# Altium footprint library chipfc_libs.PCBLIB: 315 footprints (part 14 of 20)
Each footprint in its own frame and in the unit in brackets; x right, y up, seen from the top. Pads: shape width x height; smd on the part's side, far side on the other; paste and mask are expansions set on the pad; w line width, h text height; cw(c..) or ccw(c..) is an arc to the next point about the centre after c.
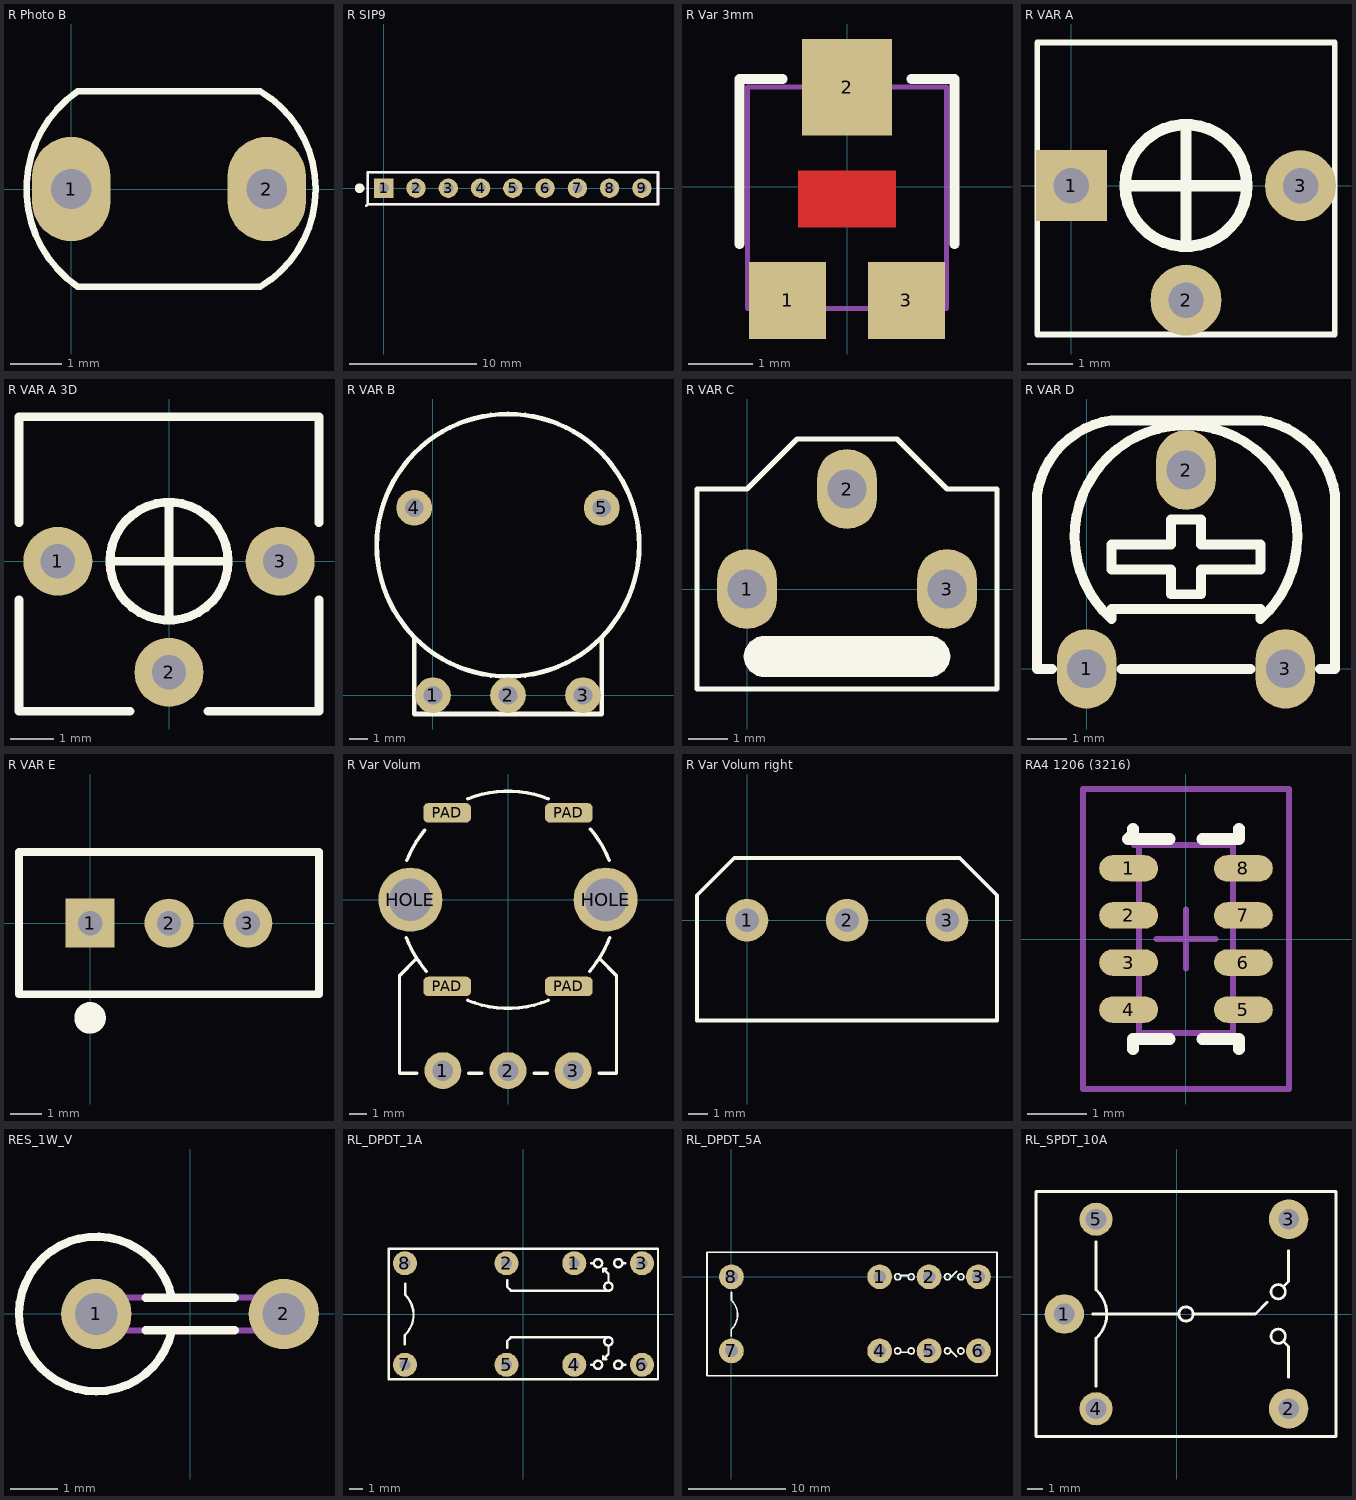
[diagram p13: the footprints below, top view; thin cyan lines are the x and y axes]

## R Photo B [mil] "Photoresistor"
pads (2):
  oval 60x80 / inner round 62 / far side oval 60x80 hole 31: 1(0,0) 2(150,0)
Top Overlay:
  lines w5: 5,-75 cw(c57.08,0) 5,75 145,75 cw(c100,0) 145,-75 5,-75

## R SIP9 [mil]
pads (9):
  rect 60x60 / inner round 60 / far side rect 60x80 hole 31: 1(0,0)
  round 60 / inner round 60 / far side oval 60x80 hole 31: 2(100,0) 3(200,0) 4(300,0) 5(400,0) 6(500,0) 7(600,0) 8(700,0) 9(800,0)
Top Overlay:
  circle w20: c-75,0 r5
  lines w8: -55,-55 -50,-50 ; -50,-50 -50,50 850,50 850,-50 -50,-50
Mechanical 1:
  lines w8: -55,-55 -50,-50 ; -50,-50 -50,50 850,50 850,-50 -50,-50

## R Var 3mm [mm]
pads (3):
  rect 1.2x1.2 smd: 1(-0.925,-1.775) 3(0.925,-1.775)
  rect 1.4x1.5 smd: 2(0,1.55)
Top Layer:
  rectangle: -0.762,-0.635 0.762,0.254
Top Overlay:
  lines w0.152: -1.675,-0.9 -1.675,1.675 -1,1.675 ; 1,1.675 1.675,1.675 1.675,-0.9
Mechanical 15:
  lines w0.076: -1.55,-1.9 -1.55,1.55 1.55,1.55 1.55,-1.9 -1.55,-1.9 ; -1.4,-1.9 -1.4,-1.3 -0.45,-1.3 -0.45,-1.9 -1.4,-1.9 ; -0.6,0.9 -0.6,1.85 0.6,1.85 0.6,0.9 -0.6,0.9 ; 0.45,-1.9 0.45,-1.3 1.4,-1.3 1.4,-1.9 0.45,-1.9
3D body "User Library-PVZ3A.STEP": height 1.95, standoff 0, extent -1.55,-1.85 1.55,1.84

## R VAR A [mil]
pads (3):
  rect 62x62 hole 31: 1(0,0)
  round 62 hole 31: 2(100,-100) 3(200,0)
Top Overlay:
  circle w10: c100,0 r53.15
  lines w5: -30,-130 -30,125 230,125 230,-130 -30,-130
  lines w10: 50,0 150,0 ; 100,-50 100,50

## R VAR A 3D [mil]
pads (3):
  round 62 hole 31: 1(-100,0) 2(0,-100) 3(100,0)
Top Overlay:
  circle w8: c0,0 r53.15
  lines w8: -135,-35 -135,-135 -35,-135 ; -135,35 -135,130 135,130 135,35 ; -50,0 50,0 ; 0,-50 0,50 ; 35,-135 135,-135 135,-35
3D body "User Library-Bien_tro_xanh_ResPVC6a.step": height 204.72, standoff -118.11, extent -135.83,-136.17 135.83,136.23

## R VAR B [mil]
pads (5):
  round 75 / inner round 60 / far side round 75 hole 39: 1(0,0) 2(157.47,0) 3(314.93,0) 4(-39.37,393.67) 5(354.3,393.67)
Top Overlay:
  circle w10: c157.47,314.93 r275.57
  lines w10: -39.37,118.1 -39.37,-39.37 354.3,-39.37 354.3,118.1

## R VAR C [mil]
pads (3):
  oval 60x80 / inner round 60 / far side oval 60x80 hole 39: 1(0,0) 2(100,100) 3(200,0)
Top Overlay:
  region: 185.15,-47.36 185.38,-47.3 185.45,-47.34 185.53,-47.32 189.93,-48.19 190.37,-48.49 190.9,-48.6 196.75,-52.51 197.05,-52.95 197.49,-53.25 201.4,-59.1 201.51,-59.63 201.81,-60.07 203.18,-66.97 203.07,-67.5 203.18,-68.03 201.81,-74.93 201.51,-75.37 201.4,-75.9 197.49,-81.75 197.05,-82.05 196.75,-82.49 190.9,-86.4 190.37,-86.51 189.93,-86.81 185.53,-87.68 185.26,-87.63 185,-87.73 15,-87.71 14.85,-87.64 14.62,-87.7 14.55,-87.66 14.47,-87.68 10.07,-86.81 9.63,-86.51 9.1,-86.4 3.25,-82.49 2.95,-82.05 2.51,-81.75 -1.4,-75.9 -1.51,-75.37 -1.81,-74.93 -3.18,-68.03 -3.07,-67.5 -3.18,-66.97 -1.81,-60.07 -1.51,-59.63 -1.4,-59.1 2.51,-53.25 2.95,-52.95 3.25,-52.51 9.1,-48.6 9.63,-48.49 10.07,-48.19 14.47,-47.32 14.55,-47.34 14.62,-47.3 14.85,-47.36 15,-47.29 185,-47.29
  lines w5: -50,-100 250,-100 250,100 200,100 150,150 50,150 0,100 -50,100 -50,-100

## R VAR D [mil]
pads (3):
  oval 60x80 / inner round 60 / far side oval 60x80 hole 39: 1(0,0) 2(100,200) 3(200,0)
Top Overlay:
  lines w10: -35,0 -50,0 -50,175 cw(c37.5,162.5) 25,250 175,250 cw(c162.5,162.5) 250,175 250,0 235,0 ; 35,0 165,0 ; 25,50 cw(c100,133.13) 175,50 175,60 25,60 25,50 ; 25,100 25,125 85,125 85,150 115,150 115,125 175,125 175,100 115,100 115,75 85,75 85,100 25,100

## R VAR E [mil]
pads (3):
  rect 62x62 hole 31: 1(0,0)
  round 62 hole 31: 2(100,0) 3(200,0)
Top Overlay:
  circle w20: c0,-120 r10
  lines w10: -90,-90 -90,90 290,90 290,-90 -90,-90
3D body "User Library-67W.step": height 459.45, standoff -181.1, extent -92.91,-97.43 292.92,97.45

## R Var Volum [mil]
pads (9):
  round 85 hole 47.24: 1(-150,-393.7) 2(0,-393.7) 3(150,-393.7)
  round 147.64 hole 98.43: HOLE(-225,0) HOLE(225,0)
  rrect50% 110x45 smd: PAD(-140,-200) PAD(-140,200) PAD(140,-200) PAD(140,200)
Top Overlay:
  lines w8: -234.08,-87.78 ccw(c0,0) -188.14,-164.63 ; -232.81,91.1 cw(c0,0) -192.06,160.05 ; -212.5,-137.5 -250,-175 -250,-400 -210,-400 ; -92.85,-232.12 ccw(c0,0) 92.85,-232.12 ; -92.85,232.12 cw(c0,0) 92.85,232.12 ; -90,-400 -60,-400 ; 60,-400 90,-400 ; 188.14,-164.63 ccw(c0,0) 234.08,-87.78 ; 189.81,162.7 cw(c0,0) 232.81,91.1 ; 210,-400 250,-400 250,-175 212.5,-137.5

## R Var Volum right [mil]
pads (3):
  round 85 hole 47.24: 1(0,0) 2(200,0) 3(400,0)
Top Overlay:
  lines w8: -100,-200 -100,0 -100,50 -25,125 425,125 500,50 500,0 500,-200 -100,-200

## RA4 1206 (3216) [mm] "Resistor Array x4 1206 (4D03)"
height 0.6
pads (8):
  oval 1x0.45 smd: 1(-0.975,1.2) 2(-0.975,0.4) 3(-0.975,-0.4) 4(-0.975,-1.2) 5(0.975,-1.2) 6(0.975,-0.4) 7(0.975,0.4) 8(0.975,1.2)
Top Overlay:
  lines w0.2: -0.9,-1.875 -0.9,-1.7 -0.275,-1.7 ; -0.9,1.875 -0.9,1.787 -0.987,1.7 -0.275,1.7 ; 0.275,-1.7 0.9,-1.7 0.9,-1.875 ; 0.275,1.7 0.9,1.7 0.9,1.875
Mechanical 13:
  lines w0.1: -0.887,1.6 -0.8,1.687 -0.8,-1.6 0.8,-1.6 0.8,1.6 -0.887,1.6
Mechanical 15:
  lines w0.1: -0.5,0 0.5,0 ; 0,-0.5 0,0.5 ; -1.75,-2.55 1.75,-2.55 1.75,2.55 -1.75,2.55 -1.75,-2.55
3D body "User Library-Array-1206-4Way-Var2-1.STEP": height 0.5, standoff 0, extent -0.8,-1.6 0.8,1.6

## RES_1W_V [mm] "PANASONIC"
height 14
pads (2):
  round 1.5 hole 0.9: 1(-2,0) 2(2,0)
Top Overlay:
  lines w0.178: -0.95,-0.35 0.95,-0.35 ; -0.95,0.35 0.95,0.35 ; -0.388,-0.35 cw(c-2,0) -2,-1.65 cw(c-2,0) -0.388,0.35
Mechanical 5:
  lines w0.127: -0.388,-0.35 cw(c-2,0) -2,-1.65 cw(c-2,0) -0.388,0.35 ; -2,-0.35 cw(c-2,0) -2,0.35 -0.95,0.35 0.95,0.35 2,0.35 cw(c2,0) 2,-0.35 0.95,-0.35 -0.95,-0.35 -2,-0.35
3D body "RES_TH_ERG1S_Vert.stp": height 13.95, standoff -2.54, extent -3.647,-1.65 2.349,1.637

## RL_DPDT_1A [mm] "Reley DPDT, 8 pin, 1A, W400mil, L800mil,H 300mil"
height 7.62
pads (8):
  round 1.8 hole 0.8: 1(3.81,3.81) 2(-1.27,3.81) 3(8.89,3.81) 4(3.81,-3.81) 5(-1.27,-3.81) 6(8.89,-3.81) 7(-8.89,-3.81) 8(-8.89,3.81)
Top Overlay:
  circle w0.178: c6.369,-2.057 r0.311
  circle w0.178: c7.112,-3.81 r0.311
  circle w0.178: c5.588,-3.81 r0.311
  circle w0.178: c6.369,2.057 r0.311
  circle w0.178: c5.588,3.81 r0.311
  circle w0.178: c7.112,3.81 r0.311
  lines w0.178: -8.89,-2.261 -8.89,-1.575 ; -8.865,-1.549 ccw(c-10.325,-0.064) -8.839,1.397 ; -8.865,1.422 -8.865,2.261 ; -1.219,-2.54 -1.219,-2.032 -0.94,-1.753 6.325,-1.753 ; -1.219,2.54 -1.219,2.032 -0.94,1.753 6.325,1.753 ; 5.08,-3.81 5.207,-3.81 ; 5.08,3.81 5.207,3.81 ; 5.969,-3.175 5.969,-3.404 ; 5.969,3.175 5.969,3.404 ; 6.223,-3.404 5.969,-3.404 ; 6.223,3.404 5.969,3.404 ; 6.375,-2.413 6.375,-2.997 5.969,-3.404 ; 6.375,2.413 6.375,2.997 5.969,3.404 ; 7.423,-3.81 7.62,-3.81 ; 7.423,3.81 7.62,3.81 ; -10.09,-4.9 -10.09,4.9 10.09,4.9 10.09,-4.9 -10.09,-4.9
3D body "User Library-TAKAMISAWA RY12W-K.step": height 12.1, standoff -3.7, extent -10.1,-4.9 10.1,4.9

## RL_DPDT_5A [mm] "Reley DPDT, 8 pin, 5A, W500mil, L1100mil,H 950mil"
height 7.62
pads (8):
  round 2.54 hole 1.3: 1(15.24,0) 2(20.32,0) 3(25.4,0) 4(15.24,-7.62) 5(20.32,-7.62) 6(25.4,-7.62) 7(0,-7.62) 8(0,0)
Top Overlay:
  circle w0.178: c23.591,-7.62 r0.311
  circle w0.178: c22.219,-7.62 r0.311
  circle w0.178: c18.485,-7.62 r0.311
  circle w0.178: c17.088,-7.62 r0.311
  circle w0.178: c17.088,0 r0.311
  circle w0.178: c18.485,0 r0.311
  circle w0.178: c22.219,0 r0.311
  circle w0.178: c23.591,0 r0.311
  lines w0.178: -0.025,-6.096 -0.025,-5.41 ; 0,-5.385 ccw(c-1.46,-3.899) 0.025,-2.438 ; 0,-2.413 0,-1.575 ; 17.45,-7.747 18.186,-7.747 ; 17.45,0.127 18.186,0.127 ; 22.555,-7.595 23.165,-8.204 ; 22.555,-0.025 23.165,0.584 ; -2.515,-10.185 27.305,-10.185 27.305,2.54 -2.515,2.54 -2.515,-10.185
3D body "User Library-TRIL-12VDC.step": height 15.71, standoff -1.7, extent -2.25,-10.1 26.75,2.6

## RL_SPDT_10A [mm] "Relay SPDT, 5 pin, 10A,W 650mil, L 800mil, H 800mil"
height 20.32
pads (5):
  round 2.5 hole 1.3: 1(-7.1,0) 2(7.1,-6) 3(7.1,6)
  round 2.1 hole 1.3: 4(-5.1,-6) 5(-5.1,6)
Top Overlay:
  circle w0.178: c6.44,-1.409 r0.452
  circle w0.178: c6.44,1.409 r0.452
  circle w0.178: c0.6,0 r0.452
  lines w0.178: -5.3,0 0.168,0 ; -5.1,-4.57 -5.1,-1.523 ; -5.1,1.523 -5.1,4.57 ; -5.078,-1.523 ccw(c-6.5,0) -5.067,1.513 ; 1.052,0 5,0 5.75,0.75 ; 6.765,-1.735 7.1,-2.07 7.1,-4 ; 6.765,1.735 7.1,2.07 7.1,4 ; -8.9,-7.75 -8.9,7.75 10.1,7.75 10.1,-7.75 -8.9,-7.75
3D body "User Library-Relay SPDT.step": height 15.4, standoff -4, extent -8.9,-7.75 10.1,7.75